# Altium footprint library EasyLib.PcbLib: 65 footprints (part 3 of 5)
Each footprint in its own frame and in the unit in brackets; x right, y up, seen from the top. Pads: shape width x height; smd on the part's side, far side on the other; paste and mask are expansions set on the pad; w line width, h text height; cw(c..) or ccw(c..) is an arc to the next point about the centre after c.
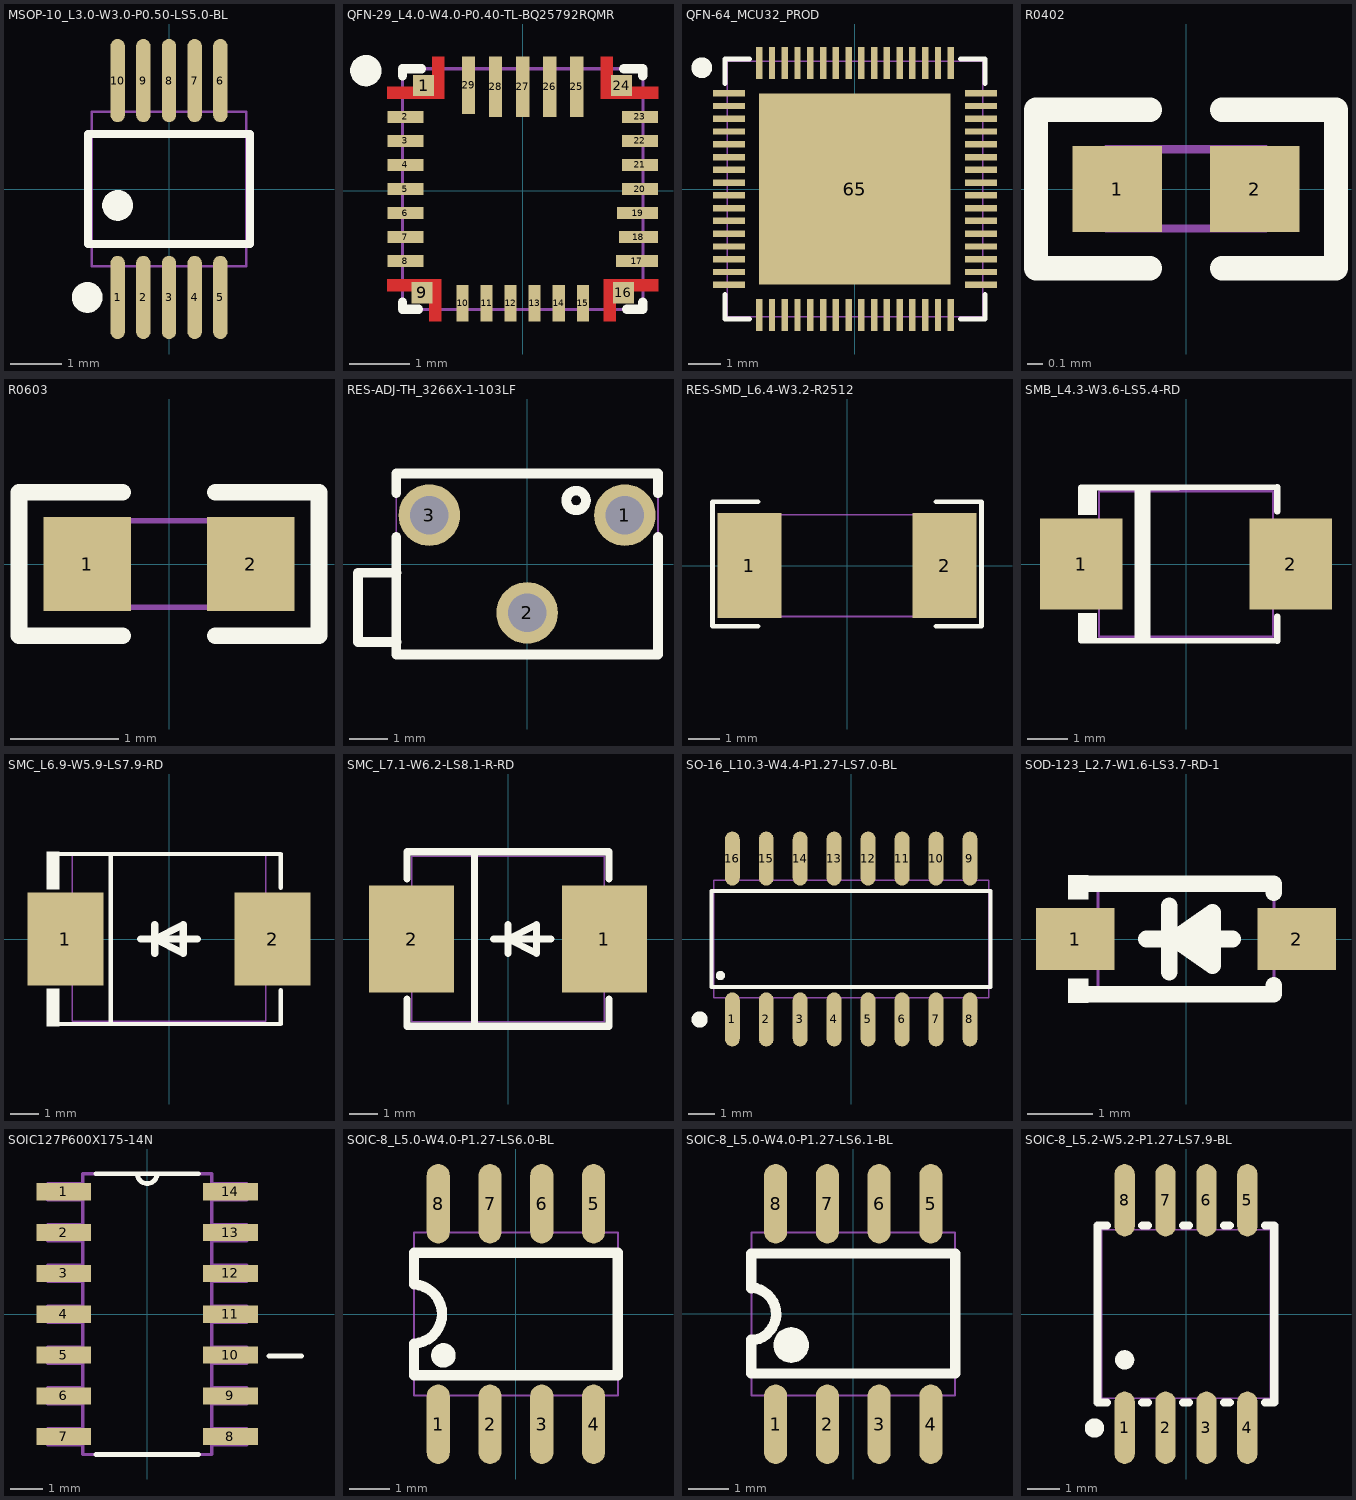
[diagram p2: the footprints below, top view; thin cyan lines are the x and y axes]

## MSOP-10_L3.0-W3.0-P0.50-LS5.0-BL [mm]
height 1.101
pads (10):
  oval 0.28x1.62 smd: 1(-1,-2.11) 2(-0.5,-2.11) 3(0,-2.11) 4(0.5,-2.11) 5(1,-2.11) 6(1,2.11) 7(0.5,2.11) 8(0,2.11) 9(-0.5,2.11) 10(-1,2.11)
Top Overlay:
  circle w0.3: c-1,-0.319 r0.15
  circle w0.3: c-1.592,-2.11 r0.15
  lines w0.152: -1.576,-1.071 -1.576,1.071 1.576,1.071 1.576,-1.071 -1.576,-1.071
Mechanical 15:
  lines w0.051: -1.5,-1.5 -1.5,1.5 1.5,1.5 1.5,-1.5 -1.5,-1.5
3D body "MSOP-10_L3.0-W3.0-H1.1-LS5.0-P0.50.step": height 1.1, standoff 0, extent -1.5,-2.5 1.5,2.5

## QFN-29_L4.0-W4.0-P0.40-TL-BQ25792RQMR [mm]
height 0.93
pads (29):
  rect 0.35x0.35 smd: 1(-1.646,1.746) 9(-1.675,-1.7) 16(1.675,-1.7) 24(1.646,1.745)
  rect 0.6x0.2 smd: 2(-1.95,1.225) 3(-1.95,0.825) 4(-1.95,0.425) 5(-1.95,0.025) 6(-1.95,-0.375) 7(-1.95,-0.775) 8(-1.95,-1.175) 20(1.95,0.025) 21(1.95,0.425) 22(1.95,0.825) 23(1.95,1.225)
  rect 0.2x0.6 smd: 10(-1,-1.875) 11(-0.6,-1.875) 12(-0.2,-1.875) 13(0.2,-1.875) 14(0.6,-1.875) 15(1,-1.875)
  rect 0.7x0.2 smd: 17(1.9,-1.175)
  rect 0.65x0.2 smd: 18(1.925,-0.775)
  rect 0.68x0.2 smd: 19(1.91,-0.376)
  rect 0.22x1 smd: 25(0.9,1.725) 26(0.45,1.725) 27(0,1.725) 28(-0.45,1.725)
  rect 0.22x0.95 smd: 29(-0.9,1.75)
Top Layer:
  region: 2.25,-1.675 2.25,-1.475 1.35,-1.475 1.35,-2.175 1.55,-2.175 1.55,-1.675
  region: -1.35,-1.475 -2.25,-1.475 -2.25,-1.675 -1.55,-1.675 -1.55,-2.175 -1.35,-2.175
  region: 1.5,1.725 1.5,2.225 1.3,2.225 1.3,1.525 2.25,1.525 2.25,1.725
  region: -1.3,2.225 -1.5,2.225 -1.5,1.725 -2.25,1.725 -2.25,1.525 -1.3,1.525
Top Overlay:
  circle w0.26: c-2.608,1.993 r0.13
  lines w0.154: -2,-1.856 -2,-1.975 -1.731,-1.975 ; -2,1.906 -2,1.999 ; -2,2.025 -1.681,2.025 ; 1.681,2.025 1.998,2.025 1.998,1.906 ; 1.731,-1.975 1.998,-1.975 1.998,-1.856
Top Paste:
  region: 2.25,-1.675 2.25,-1.475 1.35,-1.475 1.35,-2.175 1.55,-2.175 1.55,-1.675
  region: -1.35,-1.475 -2.25,-1.475 -2.25,-1.675 -1.55,-1.675 -1.55,-2.175 -1.35,-2.175
  region: 1.5,1.725 1.5,2.225 1.3,2.225 1.3,1.525 2.25,1.525 2.25,1.725
  region: -1.3,2.225 -1.5,2.225 -1.5,1.725 -2.25,1.725 -2.25,1.525 -1.3,1.525
Top Solder:
  region: 2.25,-1.675 2.25,-1.475 1.35,-1.475 1.35,-2.175 1.55,-2.175 1.55,-1.675
  region: -1.35,-1.475 -2.25,-1.475 -2.25,-1.675 -1.55,-1.675 -1.55,-2.175 -1.35,-2.175
  region: 1.5,1.725 1.5,2.225 1.3,2.225 1.3,1.525 2.25,1.525 2.25,1.725
  region: -1.3,2.225 -1.5,2.225 -1.5,1.725 -2.25,1.725 -2.25,1.525 -1.3,1.525
Mechanical 15:
  lines w0.051: -2,-1.975 -2,2.025 2,2.025 2,-1.975 -2,-1.975
3D body "QFN-29_L4.0-W4.0-P0.40-TL-BQ25792RQMR.step": height 0.93, standoff 0, extent -2.01,-2.015 2.01,2.005

## QFN-64_MCU32_PROD [mm]
height 1.011
pads (65):
  rect 1x0.2 smd: 1(-3.95,3) 2(-3.95,2.6) 3(-3.95,2.2) 4(-3.95,1.8) 5(-3.95,1.4) 6(-3.95,1) 7(-3.95,0.6) 8(-3.95,0.2) 9(-3.95,-0.2) 10(-3.95,-0.6) 11(-3.95,-1) 12(-3.95,-1.4) 13(-3.95,-1.8) 14(-3.95,-2.2) 15(-3.95,-2.6) 16(-3.95,-3) 33(3.95,-3) 34(3.95,-2.6) 35(3.95,-2.2) 36(3.95,-1.8) 37(3.95,-1.4) 38(3.95,-1) 39(3.95,-0.6) 40(3.95,-0.2) 41(3.95,0.2) 42(3.95,0.6) 43(3.95,1) 44(3.95,1.4) 45(3.95,1.8) 46(3.95,2.2) 47(3.95,2.6) 48(3.95,3)
  rect 0.2x1 smd: 17(-3,-3.95) 18(-2.6,-3.95) 19(-2.2,-3.95) 20(-1.8,-3.95) 21(-1.4,-3.95) 22(-1,-3.95) 23(-0.6,-3.95) 24(-0.2,-3.95) 25(0.2,-3.95) 26(0.6,-3.95) 27(1,-3.95) 28(1.4,-3.95) 29(1.8,-3.95) 30(2.2,-3.95) 31(2.6,-3.95) 32(3,-3.95) 49(3,3.95) 50(2.6,3.95) 51(2.2,3.95) 52(1.8,3.95) 53(1.4,3.95) 54(1,3.95) 55(0.6,3.95) 56(0.2,3.95) 57(-0.2,3.95) 58(-0.6,3.95) 59(-1,3.95) 60(-1.4,3.95) 61(-1.8,3.95) 62(-2.2,3.95) 63(-2.6,3.95) 64(-3,3.95)
  rect 6x6 smd: 65(0,0)
Top Overlay:
  circle w0.35: c-4.8,3.8 r0.15
  lines w0.152: -4.076,-3.303 -4.076,-4.076 -3.303,-4.076 ; -4.076,3.303 -4.076,4.076 -3.303,4.076 ; 3.303,-4.076 4.076,-4.076 4.076,-3.303 ; 3.303,4.076 4.076,4.076 4.076,3.303
Mechanical 15:
  lines w0.051: -4,-4 -4,4 4,4 4,-4 -4,-4
3D body "QFN-64_L8.0-W8.0-H1.0-P0.40.step": height 1.01, standoff 0, extent -4.01,-4.01 4.01,4.01

## R0402 [mm]
height 0.36
pads (2):
  rect 0.566x0.54 smd: 1(-0.433,0) 2(0.433,0)
Top Overlay:
  lines w0.152: -0.226,-0.499 -0.944,-0.499 -0.944,0.499 -0.226,0.499 ; 0.226,-0.499 0.944,-0.499 0.944,0.499 0.226,0.499
Mechanical 15:
  lines w0.051: -0.5,-0.25 -0.5,0.25 0.5,0.25 0.5,-0.25 -0.5,-0.25
3D body "R0402_L1.0-W0.5-H0.4.step": height 0.36, standoff 0, extent -0.5,-0.25 0.5,0.251

## R0603 [mm]
height 0.45
pads (2):
  rect 0.806x0.864 smd: 1(-0.753,0) 2(0.753,0)
Top Overlay:
  lines w0.152: -0.426,-0.661 -1.385,-0.661 -1.385,0.661 -0.426,0.661 ; 0.426,-0.661 1.385,-0.661 1.385,0.661 0.426,0.661
Mechanical 15:
  lines w0.051: -0.8,-0.4 -0.8,0.4 0.8,0.4 0.8,-0.4 -0.8,-0.4
3D body "R0603.step": height 0.45, standoff 0, extent -0.81,-0.405 0.81,0.405

## RES-ADJ-TH_3266X-1-103LF [mm]
height 7.3
pads (3):
  round 1.6 hole 1: 1(2.54,1.27) 2(0,-1.27) 3(-2.54,1.27)
Top Overlay:
  lines w0.254: -3.4,0.703 -3.4,-2.35 3.4,-2.35 3.4,0.703 ; -3.4,1.837 -3.4,2.35 3.4,2.35 3.4,1.837 ; -3.394,-2.029 -4.394,-2.029 -4.394,-0.229 -3.394,-0.229 ; 1.27,1.905 ccw(c1.273,1.651) 1.275,1.905
Mechanical 15:
  lines w0.051: -3.4,-2.35 -3.4,2.35 3.4,2.35 3.4,-2.35 -3.4,-2.35
3D body "RES-ADJ-TH_3266X-1-103LF.step": height 7.3, standoff 0, extent -4.385,-2.43 3.415,2.271

## RES-SMD_L6.4-W3.2-R2512 [mm]
height 0.72
pads (2):
  rect 2x3.3 smd: 1(-3.066,0) 2(3.066,0)
Top Overlay:
  lines w0.152: -2.794,-1.905 -4.229,-1.905 -4.229,2.008 -2.794,2.008 ; 2.794,-1.905 4.229,-1.905 4.229,2.008 2.794,2.008
Mechanical 15:
  lines w0.051: -3.2,-1.6 -3.2,1.6 3.2,1.6 3.2,-1.6 -3.2,-1.6
3D body "RES-SMD_L6.4-W3.2-R2512.step": height 0.72, standoff 0, extent -3.21,-1.61 3.21,1.61

## SMB_L4.3-W3.6-LS5.4-RD [mm]
height 2.26
pads (2):
  rect 2.047x2.241 smd: 1(-2.591,0) 2(2.591,0)
Top Overlay:
  region: -2.667,-1.905 -2.667,-1.215 -2.21,-1.215 -2.21,-1.905
  region: -2.667,1.905 -2.667,1.215 -2.21,1.215 -2.21,1.905
  region: -1.27,1.892 -1.27,-1.895 -0.889,-1.895 -0.889,1.893
  lines w0.152: -2.597,1.889 2.253,1.905 2.257,1.905 2.257,1.301 ; -2.593,-1.892 2.257,-1.905 2.257,-1.301
Mechanical 15:
  lines w0.051: -2.15,-1.8 -2.15,1.8 2.15,1.8 2.15,-1.8 -2.15,-1.8
3D body "SMB_L4.3-W3.6-LS5.4-RD.step": height 2.26, standoff 0, extent -2.7,-1.81 2.7,1.81

## SMC_L6.9-W5.9-LS7.9-RD [mm]
height 2.1
pads (2):
  rect 2.7x3.3 smd: 1(-3.686,0) 2(3.686,0)
Top Overlay:
  region: -3.9,3.102 -3.9,1.772 -4.357,1.772 -4.357,3.102
  region: -3.9,-3.102 -3.9,-1.772 -4.357,-1.772 -4.357,-3.102
  lines w0.152: -3.976,-3.026 3.976,-3.026 3.976,-1.823 ; -3.976,3.026 3.976,3.026 3.976,1.823 ; -2.069,-3.026 -2.069,3.026
  lines w0.254: -1.016,0 1.016,0 ; -0.508,0.508 -0.508,-0.508 -0.508,0 ; -0.508,0 0.508,-0.508 0.508,0.508 -0.508,0
Mechanical 15:
  lines w0.051: -3.45,-2.921 -3.45,2.979 3.45,2.979 3.45,-2.921 -3.45,-2.921
3D body "SMC_L6.9-W5.9-LS7.9-RD.step": height 2.1, standoff 0, extent -4,-3 4,3

## SMC_L7.1-W6.2-LS8.1-R-RD [mm] "SK86"
height 2.1
pads (2):
  rect 3.03x3.82 smd: 1(3.435,0) 2(-3.435,0)
Top Overlay:
  lines w0.254: -3.6,-2.141 -3.6,-3.11 3.6,-3.11 3.6,-2.141 ; -3.6,2.141 -3.6,3.11 3.6,3.11 3.6,2.141 ; -1.192,-3.11 -1.192,3.11 ; -0.508,0 1.524,0 ; 0,0.508 0,-0.508 0,0 ; 0,0 1.016,-0.508 1.016,0.508 0,0
Mechanical 15:
  lines w0.051: -3.428,-2.952 3.428,-2.952 3.428,2.952 -3.428,2.952 -3.428,-2.952
3D body "SMC_L7.1-W6.2-LS8.1-RD.step": height 2.1, standoff 0, extent -4,-3 4,3

## SO-16_L10.3-W4.4-P1.27-LS7.0-BL [mm]
height 2.17
pads (16):
  oval 0.56x2.02 smd: 1(-4.445,-3.01) 2(-3.175,-3.01) 3(-1.905,-3.01) 4(-0.635,-3.01) 5(0.635,-3.01) 6(1.905,-3.01) 7(3.175,-3.01) 8(4.445,-3.01) 9(4.445,3.01) 10(3.175,3.01) 11(1.905,3.01) 12(0.635,3.01) 13(-0.635,3.01) 14(-1.905,3.01) 15(-3.175,3.01) 16(-4.445,3.01)
Top Overlay:
  circle w0.175: c-4.889,-1.368 r0.087
  circle w0.4: c-5.665,-3.01 r0.1
  lines w0.152: -5.216,-1.8 5.216,-1.8 5.216,1.8 -5.216,1.8 -5.216,-1.695 -5.216,-1.8
Mechanical 15:
  lines w0.051: -5.14,-2.2 -5.14,2.2 5.14,2.2 5.14,-2.2 -5.14,-2.2
3D body "SO-16_L10.3-W4.4-H2.1-P1.27.step": height 2.17, standoff 0, extent -5.15,-3.503 5.15,3.503

## SOD-123_L2.7-W1.6-LS3.7-RD-1 [mm]
height 1.45
pads (2):
  rect 1.2x0.95 smd: 1(-1.7,0) 2(1.7,0)
Top Overlay:
  region: 0.406,-0.406 0.406,0.406 -0.178,0
  region: -1.502,0.977 -1.502,0.607 -1.806,0.607 -1.806,0.977
  region: -1.502,-0.977 -1.502,-0.607 -1.806,-0.607 -1.806,-0.977
  lines w0.254: -1.644,0.849 -1.643,0.85 -1.346,0.85 1.346,0.85 1.346,0.706 ; -1.639,-0.849 -1.638,-0.85 -1.346,-0.85 1.346,-0.85 1.346,-0.706 ; -0.61,0 -0.28,0 ; -0.254,-0.508 -0.254,0.508 ; 0.406,0 0.72,0 ; -0.178,0 0.406,0.406 0.406,-0.406 -0.178,0
Mechanical 15:
  lines w0.051: -1.35,-0.8 -1.35,0.8 1.35,0.8 1.35,-0.8 -1.35,-0.8
3D body "SOD-123_L2.7-W1.6-LS3.7-RD-1.step": height 1.45, standoff 0, extent -1.925,-0.85 1.925,0.85

## SOIC127P600X175-14N [mil] "NAND Gate IC 4 Channel  14-SO"
height 170.28
pads (14):
  rect 67x21 smd: 1(-102,150) 2(-102,100) 3(-102,50) 4(-102,0) 5(-102,-50) 6(-102,-100) 7(-102,-150) 8(102,-150) 9(102,-100) 10(102,-50) 11(102,0) 12(102,50) 13(102,100) 14(102,150)
Top Overlay:
  lines w6: -63,-172 63,-172 ; -63,172 -12,172 ; 63,172 12,172 ; 149,-51 189,-51 ; -12,172 ccw(c0,172) 12,172 ; -12,172 12,172
Mechanical 13:
  lines w1: -12,172 ccw(c0,172) 12,172
  lines w3.94: -122,-160 -122,-140 -79,-140 -79,-160 -122,-160 ; -122,-110 -122,-90 -79,-90 -79,-110 -122,-110 ; -122,-60 -122,-40 -79,-40 -79,-60 -122,-60 ; -122,-10 -122,10 -79,10 -79,-10 -122,-10 ; -122,40 -122,60 -79,60 -79,40 -122,40 ; -122,90 -122,110 -79,110 -79,90 -122,90 ; -122,140 -122,160 -79,160 -79,140 -122,140 ; -79,-172 79,-172 79,172 12,172 -12,172 -79,172 -79,-172 ; 79,-160 79,-140 122,-140 122,-160 79,-160 ; 79,-110 79,-90 122,-90 122,-110 79,-110 ; 79,-60 79,-40 122,-40 122,-60 79,-60 ; 79,-10 79,10 122,10 122,-10 79,-10 ; 79,40 79,60 122,60 122,40 79,40 ; 79,90 79,110 122,110 122,90 79,90 ; 79,140 79,160 122,160 122,140 79,140
3D body "74LVC00AD.step": height 170.28, standoff 0, extent -118.11,0 118.11,68.9

## SOIC-8_L5.0-W4.0-P1.27-LS6.0-BL [mil]
height 66.93
pads (8):
  oval 22.38x76.78 smd: 1(-75,-106.5) 2(-25,-106.5) 3(25,-106.5) 4(75,-106.5) 5(75,106.5) 6(25,106.5) 7(-25,106.5) 8(-75,106.5)
Top Overlay:
  circle w11.81: c-70,-40 r5.91
  lines w10: -98.43,-28.61 ccw(c-99.99,0) -98.23,28.59 ; -98.42,-28.61 -98.42,-59.05 98.42,-59.05 98.42,59.05 -98.42,59.05 -98.42,28.59
Mechanical 15:
  lines w2: -98.42,-78.74 -98.42,78.74 98.42,78.74 98.42,-78.74 -98.42,-78.74
3D body "SOIC-8_L5.0-W4.0-P1.27-LS6.0-BL.step": height 66.93, standoff 0, extent -96.46,-118.11 96.46,118.11

## SOIC-8_L5.0-W4.0-P1.27-LS6.1-BL [mil]
height 61.06
pads (8):
  oval 22.38x76.78 smd: 1(-75,-106.5) 2(-25,-106.5) 3(25,-106.5) 4(75,-106.5) 5(75,106.5) 6(25,106.5) 7(-25,106.5) 8(-75,106.5)
Top Overlay:
  region: -76.9,-30 -76.79,-27.87 -76.4,-25.77 -75.75,-23.74 -74.86,-21.8 -73.72,-20 -72.37,-18.35 -70.82,-16.88 -69.1,-15.62 -67.23,-14.59 -65.25,-13.8 -63.18,-13.27 -61.07,-13 -58.93,-13 -56.82,-13.27 -54.75,-13.8 -52.77,-14.59 -50.9,-15.62 -49.18,-16.88 -47.63,-18.35 -46.28,-20 -45.14,-21.8 -44.25,-23.74 -43.6,-25.77 -43.21,-27.87 -43.09,-30 -43.21,-32.13 -43.6,-34.23 -44.25,-36.26 -45.14,-38.2 -46.28,-40 -47.63,-41.65 -49.18,-43.12 -50.9,-44.38 -52.77,-45.41 -54.75,-46.2 -56.82,-46.73 -58.93,-47 -61.07,-47 -63.18,-46.73 -65.25,-46.2 -67.23,-45.41 -69.1,-44.38 -70.82,-43.12 -72.37,-41.65 -73.72,-40 -74.86,-38.2 -75.75,-36.26 -76.4,-34.23 -76.79,-32.13
  lines w10: -98.42,-25 -98.42,-57.51 98.42,-57.51 98.42,58.41 -98.42,58.41 -98.42,25 ; -95,-25 ccw(c-100,0) -93.82,24.73
Mechanical 15:
  lines w2: -98.43,-78.74 -98.43,78.74 98.42,78.74 98.42,-78.74 -98.43,-78.74
3D body "SOIC-8_L5.0-W4.0-P1.27-LS6.1-BL.step": height 61.06, standoff 0, extent -96.46,-118.11 96.46,118.11

## SOIC-8_L5.2-W5.2-P1.27-LS7.9-BL [mm]
height 1.951
pads (8):
  oval 0.63x2.25 smd: 1(-1.905,-3.53) 2(-0.635,-3.53) 3(0.635,-3.53) 4(1.905,-3.53) 5(1.905,3.53) 6(0.635,3.53) 7(-0.635,3.53) 8(-1.905,3.53)
Top Overlay:
  circle w0.3: c-1.905,-1.424 r0.15
  circle w0.3: c-2.84,-3.54 r0.15
  lines w0.254: -2.75,2.75 -2.75,-2.75 -2.451,-2.75 ; -2.73,2.75 -2.451,2.75 ; -1.359,-2.75 -1.181,-2.75 ; -1.359,2.75 -1.181,2.75 ; -0.089,-2.75 0.089,-2.75 ; -0.089,2.75 0.089,2.75 ; 1.181,-2.75 1.359,-2.75 ; 1.181,2.75 1.359,2.75 ; 2.451,-2.751 2.741,-2.751 2.741,2.751 ; 2.451,2.751 2.741,2.751 ; 2.741,2.751 2.741,2.751
Mechanical 15:
  lines w0.051: -2.615,-2.615 -2.615,2.615 2.615,2.615 2.615,-2.615 -2.615,-2.615
3D body "SOIC-8_L5.2-W5.2-P1.27-LS7.9-BL.step": height 1.95, standoff 0, extent -2.615,-3.95 2.615,3.95